# Altium footprint library Footprints.PcbLib: 320 footprints (part 9 of 20)
Each footprint in its own frame and in the unit in brackets; x right, y up, seen from the top. Pads: shape width x height; smd on the part's side, far side on the other; paste and mask are expansions set on the pad; w line width, h text height; cw(c..) or ccw(c..) is an arc to the next point about the centre after c.
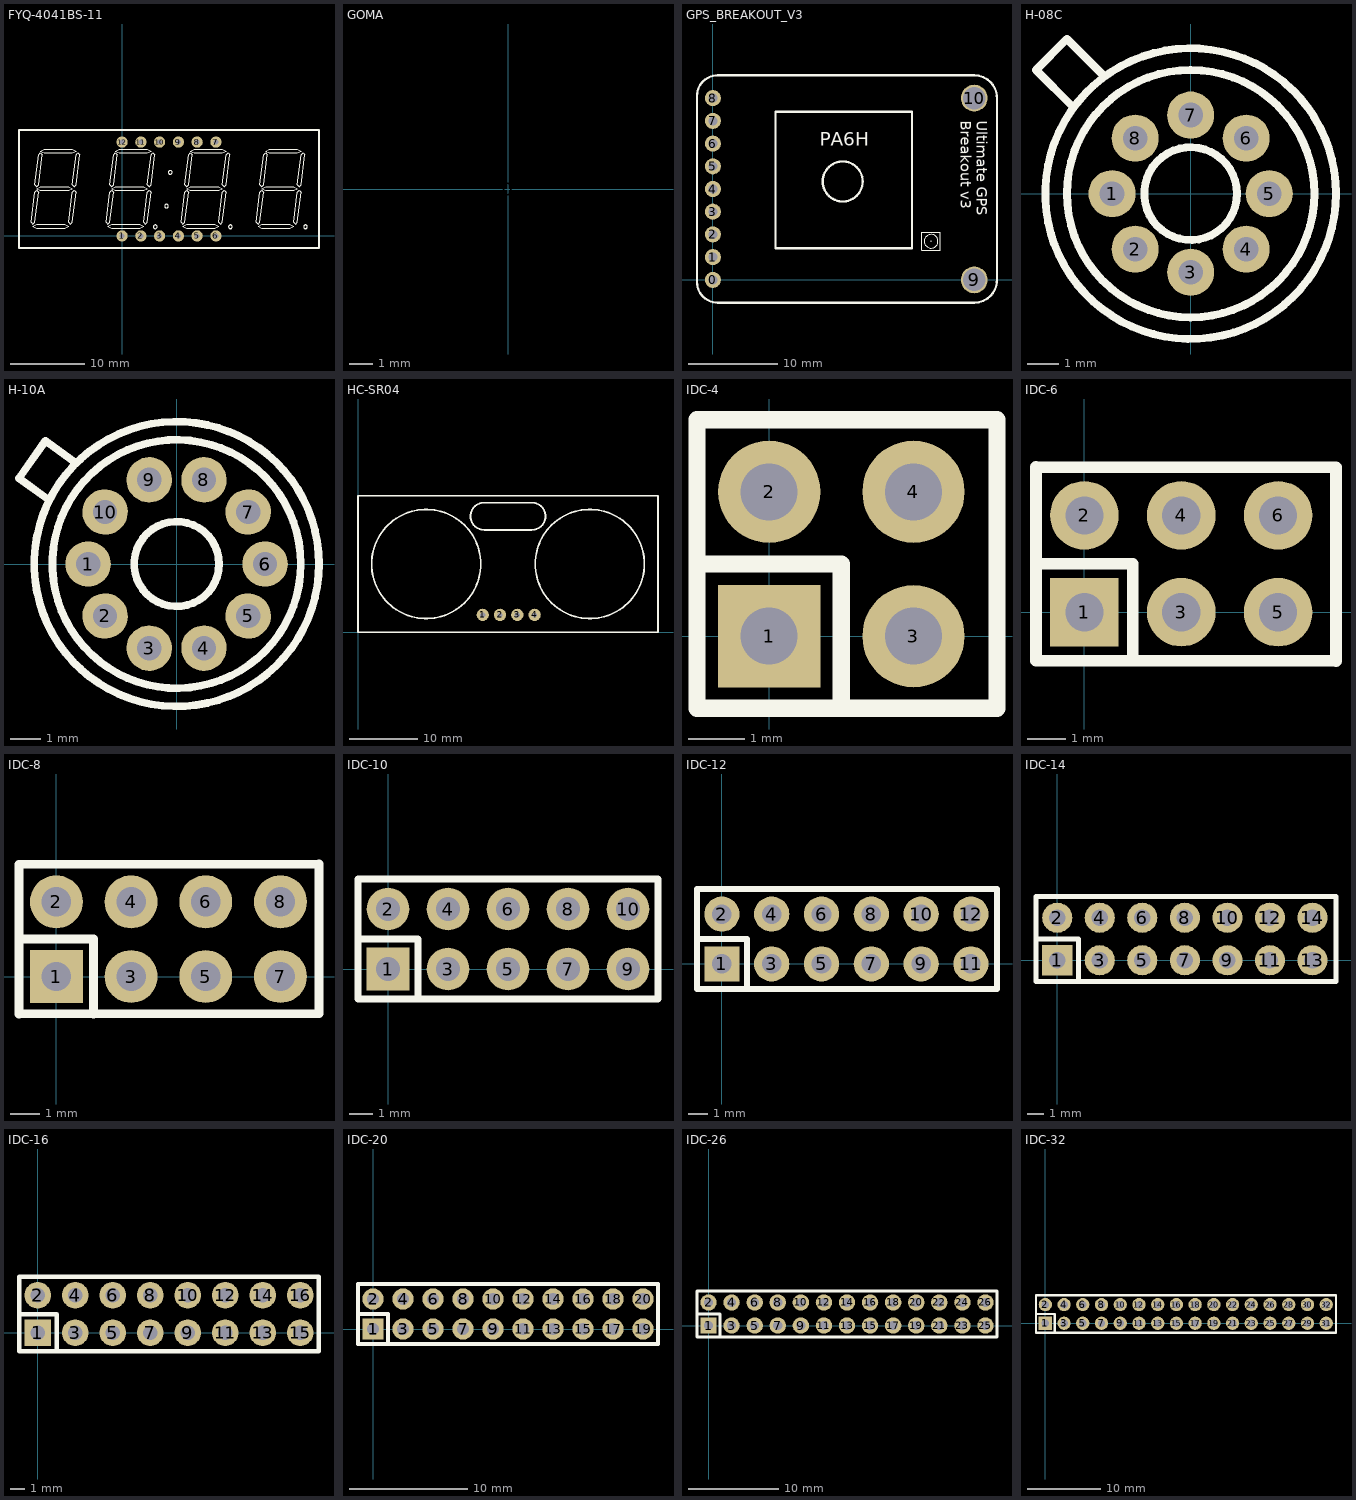
[diagram p8: the footprints below, top view; thin cyan lines are the x and y axes]

## FYQ-4041BS-11 [mil]
pads (12):
  round 60 hole 27.56: 1(0,0) 2(100,0) 3(200,0) 4(300,0) 5(400,0) 6(500,0) 7(500,500) 8(400,500) 9(300,500) 10(200,500) 11(100,500) 12(0,500)
Top Overlay:
  drawing of 317 lines, arcs and shapes, not listed
3D body: height 0, standoff 0, extent -554.21,-68.98 1054.21,568.98

## GOMA [mm]
pads (1):
  round 12.6 on Bottom Solder: 0(0,0)

## GPS_BREAKOUT_V3 [mm]
pads (11):
  round 1.8 hole 1: 0(0,0) 1(0,2.54) 2(0,5.08) 3(0,7.62) 4(0,10.16) 5(0,12.7) 6(0,15.24) 7(0,17.78) 8(0,20.32)
  round 3 hole 2.5: 9(29.21,0) 10(29.21,20.32)
Top Overlay:
  circle w0.15: c24.384,4.318 r0.025
  circle w0.1: c24.384,4.318 r0.762
  circle w0.254: c14.5,11 r2.236
  lines w0.1: 23.368,3.302 25.4,3.302 25.4,5.334 23.368,5.334 23.368,3.302
  lines w0.254: -1.778,-0.254 ccw(c0.508,-0.254) 0.508,-2.54 29.21,-2.54 ccw(c29.21,0) 31.75,0 31.75,20.32 ccw(c29.21,20.32) 29.21,22.86 0.508,22.86 ccw(c0.508,20.574) -1.778,20.574 -1.778,-0.254 ; 7,3.54 22.24,3.54 22.24,18.78 7,18.78 7,3.54
  text "Ultimate GPS / Breakout v3" at 27.686,17.78 h1.2
  text "PA6H" at 11.938,14.986 h1.52

## H-08C [mm]
pads (8):
  round 1.524 hole 0.8: 1(-2.54,0) 2(-1.795,-1.795) 3(0,-2.54) 4(1.795,-1.795) 5(2.54,0) 6(1.795,1.795) 7(0,2.54) 8(-1.795,1.795)
Top Overlay:
  circle w0.254: c0,0 r4
  circle w0.254: c0,0 r1.5
  circle w0.254: c0,0 r4.7
  lines w0.254: -4,5 -2.82,3.82 -2.82,3.81 ; -3.989,4.989 -4.011,4.989 -5,4 -3.81,2.81 -3.81,2.79 ; -3.505,4.495 -3.495,4.495

## H-10A [mm]
pads (11):
  round 1.5 hole 0.8: 1(-2.92,0) 2(-2.362,-1.716) 3(-0.902,-2.777) 4(0.902,-2.777) 5(2.362,-1.716) 6(2.92,0) 6(2.92,0) 7(2.362,1.716) 8(0.902,2.777) 9(-0.902,2.777) 10(-2.362,1.716)
Top Overlay:
  circle w0.254: c0,0 r4.7
  circle w0.254: c0,0 r4.1
  circle w0.254: c0,0 r1.4
  lines w0.254: -4.33,4.06 -5.202,2.826 -4.24,2.13 ; -4.29,4.04 -3.31,3.33

## HC-SR04 [mm]
pads (4):
  round 1.8 hole 0.762: 1(18.288,2.54) 2(20.828,2.54) 3(23.368,2.54) 4(25.908,2.54)
Top Overlay:
  circle w0.254: c10,10 r8
  circle w0.254: c34,10 r8
  lines w0.254: 0,0 44,0 44,20 0,20 0,0 ; 16.5,17 ccw(c18.5,17) 18.5,15 25.5,15 ccw(c25.5,17) 27.5,17 ccw(c25.5,17) 25.5,19 18.5,19 ccw(c18.5,17) 16.5,17

## IDC-4 [mm]
pads (4):
  rect 1.8x1.8 hole 1: 1(0,0)
  round 1.8 hole 1: 2(0,2.54) 3(2.54,0) 4(2.54,2.54)
Top Overlay:
  lines w0.305: -1.27,1.27 1.27,1.27 1.27,-1.27 ; -1.27,-1.27 4.01,-1.27 4.01,3.81 -1.27,3.81 -1.27,-1.27

## IDC-6 [mm]
pads (6):
  rect 1.8x1.8 hole 1: 1(0,0)
  round 1.8 hole 1: 2(0,2.54) 3(2.54,0) 4(2.54,2.54) 5(5.08,0) 6(5.08,2.54)
Top Overlay:
  lines w0.305: -1.27,1.27 1.27,1.27 1.27,-1.27 ; -1.27,-1.27 6.6,-1.28 6.6,3.8 -1.27,3.81 -1.27,-1.27

## IDC-8 [mm]
pads (8):
  rect 1.8x1.8 hole 1: 1(0,0)
  round 1.8 hole 1: 2(0,2.54) 3(2.54,0) 4(2.54,2.54) 5(5.08,0) 6(5.08,2.54) 7(7.62,0) 8(7.62,2.54)
Top Overlay:
  lines w0.305: -1.27,1.27 1.27,1.27 1.27,-1.27 ; -1.27,-1.27 -1.27,3.81 8.93,3.82 8.93,-1.26 -1.27,-1.27

## IDC-10 [mm]
pads (10):
  rect 1.8x1.8 hole 1: 1(0,0)
  round 1.8 hole 1: 2(0,2.54) 3(2.54,0) 4(2.54,2.54) 5(5.08,0) 6(5.08,2.54) 7(7.62,0) 8(7.62,2.54) 9(10.16,0) 10(10.16,2.54)
Top Overlay:
  lines w0.305: -1.27,1.27 1.27,1.27 1.27,-1.27 ; -1.27,-1.27 11.43,-1.27 11.43,3.81 -1.27,3.81 -1.27,-1.27

## IDC-12 [mm]
pads (12):
  rect 1.8x1.8 hole 1: 1(0,0)
  round 1.8 hole 1: 2(0,2.54) 3(2.54,0) 4(2.54,2.54) 5(5.08,0) 6(5.08,2.54) 7(7.62,0) 8(7.62,2.54) 9(10.16,0) 10(10.16,2.54) 11(12.7,0) 12(12.7,2.54)
Top Overlay:
  lines w0.305: -1.27,1.27 1.27,1.27 1.27,-1.27 ; -1.27,-1.27 14.03,-1.27 14.03,3.81 -1.27,3.81 -1.27,-1.27

## IDC-14 [mm]
pads (14):
  rect 1.8x1.8 hole 1: 1(0,0)
  round 1.8 hole 1: 2(0,2.54) 3(2.54,0) 4(2.54,2.54) 5(5.08,0) 6(5.08,2.54) 7(7.62,0) 8(7.62,2.54) 9(10.16,0) 10(10.16,2.54) 11(12.7,0) 12(12.7,2.54) 13(15.24,0) 14(15.24,2.54)
Top Overlay:
  lines w0.305: -1.27,1.27 1.27,1.27 1.27,-1.27 ; -1.27,-1.27 16.65,-1.27 16.65,3.81 -1.27,3.81 -1.27,-1.27

## IDC-16 [mm]
pads (16):
  rect 1.8x1.8 hole 1: 1(0,0)
  round 1.8 hole 1: 2(0,2.54) 3(2.54,0) 4(2.54,2.54) 5(5.08,0) 6(5.08,2.54) 7(7.62,0) 8(7.62,2.54) 9(10.16,0) 10(10.16,2.54) 11(12.7,0) 12(12.7,2.54) 13(15.24,0) 14(15.24,2.54) 15(17.78,0) 16(17.78,2.54)
Top Overlay:
  lines w0.305: -1.27,1.27 1.27,1.27 1.27,-1.27 ; -1.27,-1.27 -1.27,3.81 19.05,3.81 19.05,-1.27 -1.27,-1.27

## IDC-20 [mm]
pads (20):
  rect 1.8x1.8 hole 1: 1(0,0)
  round 1.8 hole 1: 2(0,2.54) 3(2.54,0) 4(2.54,2.54) 5(5.08,0) 6(5.08,2.54) 7(7.62,0) 8(7.62,2.54) 9(10.16,0) 10(10.16,2.54) 11(12.7,0) 12(12.7,2.54) 13(15.24,0) 14(15.24,2.54) 15(17.78,0) 16(17.78,2.54) 17(20.32,0) 18(20.32,2.54) 19(22.86,0) 20(22.86,2.54)
Top Overlay:
  lines w0.305: -1.27,1.27 1.27,1.27 1.27,-1.27 ; -1.27,-1.27 24.13,-1.27 24.13,3.81 -1.27,3.81 -1.27,-1.27

## IDC-26 [mm]
pads (26):
  rect 1.8x1.8 hole 1: 1(0,0)
  round 1.8 hole 1: 2(0,2.54) 3(2.54,0) 4(2.54,2.54) 5(5.08,0) 6(5.08,2.54) 7(7.62,0) 8(7.62,2.54) 9(10.16,0) 10(10.16,2.54) 11(12.7,0) 12(12.7,2.54) 13(15.24,0) 14(15.24,2.54) 15(17.78,0) 16(17.78,2.54) 17(20.32,0) 18(20.32,2.54) 19(22.86,0) 20(22.86,2.54) 21(25.4,0) 22(25.4,2.54) 23(27.94,0) 24(27.94,2.54) 25(30.48,0) 26(30.48,2.54)
Top Overlay:
  lines w0.305: -1.27,1.27 1.27,1.27 1.27,-1.27 ; -1.27,-1.27 31.75,-1.27 31.75,3.81 -1.27,3.81 -1.27,-1.27

## IDC-32 [mm]
pads (32):
  rect 1.8x1.8 hole 1: 1(0,0)
  round 1.8 hole 1: 2(0,2.54) 3(2.54,0) 4(2.54,2.54) 5(5.08,0) 6(5.08,2.54) 7(7.62,0) 8(7.62,2.54) 9(10.16,0) 10(10.16,2.54) 11(12.7,0) 12(12.7,2.54) 13(15.24,0) 14(15.24,2.54) 15(17.78,0) 16(17.78,2.54) 17(20.32,0) 18(20.32,2.54) 19(22.86,0) 20(22.86,2.54) 21(25.4,0) 22(25.4,2.54) 23(27.94,0) 24(27.94,2.54) 25(30.48,0) 26(30.48,2.54) 27(33.02,0) 28(33.02,2.54) 29(35.56,0) 30(35.56,2.54) 31(38.1,0) 32(38.1,2.54)
Top Overlay:
  lines w0.305: -1.27,1.27 1.27,1.27 1.27,-1.27 ; -1.27,-1.27 39.43,-1.29 39.43,3.79 -1.27,3.81 -1.27,-1.27